# Altium schematic symbol library terminal_block.SchLib: 1 symbol
Pins are listed as number, name and electrical type; pins without a type are passive.

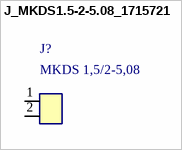
[diagram p0: symbol J_MKDS1.5-2-5.08_1715721]

## J_MKDS1.5-2-5.08_1715721
designator J?, comment MKDS 1,5/2-5,08
Screw terminal 2-pos 5.08 mm, 17.5 A, 250 V; Manufacturer: Phoenix Contact; MPN: 1715721; Value: MKDS 1,5/2-5,08; LCSC: C480516; JLCPCB Type: Extended (hand-soldered, not in SMT order); Datasheet: 1715721_C480516.pdf
footprint TB_MKDS1.5-2-5.08
pins: 1, 2